# Altium footprint library CL21A226MAYNNNE.PcbLib: 3 footprints
Each footprint in its own frame and in the unit in brackets; x right, y up, seen from the top. Pads: shape width x height; smd on the part's side, far side on the other; paste and mask are expansions set on the pad; w line width, h text height; cw(c..) or ccw(c..) is an arc to the next point about the centre after c.
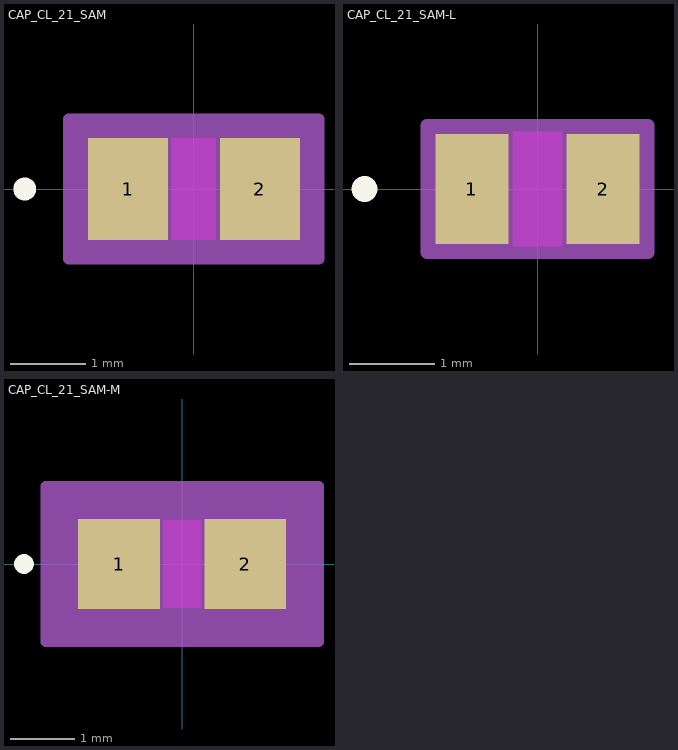
[diagram p0: the footprints below, top view; thin cyan lines are the x and y axes]

## CAP_CL_21_SAM [mil]
pads (2):
  rect 41.78x53 smd paste+0 mask+0: 1(-34.39,0) 2(34.39,0)
Top Layer keep-out:
  region: -11.5,-24.5 -11.5,24.5 11.5,24.5 11.5,-24.5
Top Overlay:
  circle w6: c-88.28,0 r3
  text ".Designator" at -137.5,-25 h50
Keep-Out Layer:
  region: -11.5,-26.5 -11.5,26.5 11.5,26.5 11.5,-26.5
Mechanical 13:
  circle w1: c-29.39,0 r3
  lines w1: -41.5,-26.5 -41.5,26.5 ; -41.5,-26.5 -13.5,-26.5 -13.5,26.5 -41.5,26.5 ; -41.5,-26.5 41.5,-26.5 ; -41.5,-26.5 -41.5,26.5 ; -41.5,26.5 41.5,26.5 ; 41.5,-26.5 13.5,-26.5 13.5,26.5 41.5,26.5 ; 41.5,-26.5 41.5,26.5 ; 41.5,-26.5 41.5,26.5
  text ".Designator" at -137.5,-25 h50
Mechanical 15:
  region: 65.28,-36.5 -65.28,-36.5 -65.28,36.5 65.28,36.5
  lines w6: -65.28,-36.5 -65.28,36.5 65.28,36.5 65.28,-36.5 -65.28,-36.5
3D body "CAP_CL_21_SAM.step": height 52.99, standoff 0, extent -41.5,-26.5 41.5,26.5

## CAP_CL_21_SAM-L [mil]
pads (2):
  rect 33.91x51.03 smd paste+0 mask+0: 1(-30.45,0) 2(30.45,0)
Top Layer keep-out:
  region: -11.5,-24.5 -11.5,24.5 11.5,24.5 11.5,-24.5
Top Overlay:
  circle w6: c-80.41,0 r3
  text ".Designator" at -137.5,-25 h50
Keep-Out Layer:
  region: -11.5,-26.5 -11.5,26.5 11.5,26.5 11.5,-26.5
Mechanical 13:
  circle w1: c-25.45,0 r3
  lines w1: -41.5,-26.5 -41.5,26.5 ; -41.5,-26.5 -13.5,-26.5 -13.5,26.5 -41.5,26.5 ; -41.5,-26.5 41.5,-26.5 ; -41.5,-26.5 -41.5,26.5 ; -41.5,26.5 41.5,26.5 ; 41.5,-26.5 13.5,-26.5 13.5,26.5 41.5,26.5 ; 41.5,-26.5 41.5,26.5 ; 41.5,-26.5 41.5,26.5
  text ".Designator" at -137.5,-25 h50
Mechanical 15:
  region: 51.41,-29.52 -51.41,-29.52 -51.41,29.52 51.41,29.52
  lines w6: -51.41,-29.52 -51.41,29.52 51.41,29.52 51.41,-29.52 -51.41,-29.52
3D body "CAP_CL_21_SAM.step": height 52.99, standoff 0, extent -41.5,-26.5 41.5,26.5

## CAP_CL_21_SAM-M [mil]
pads (2):
  rect 49.65x54.97 smd paste+0 mask+0: 1(-38.33,0) 2(38.33,0)
Top Layer keep-out:
  region: -11.5,-24.5 -11.5,24.5 11.5,24.5 11.5,-24.5
Top Overlay:
  circle w6: c-96.15,0 r3
  text ".Designator" at -137.5,-25 h50
Keep-Out Layer:
  region: -11.5,-26.5 -11.5,26.5 11.5,26.5 11.5,-26.5
Mechanical 13:
  circle w1: c-33.33,0 r3
  lines w1: -41.5,-26.5 -41.5,26.5 ; -41.5,-26.5 -13.5,-26.5 -13.5,26.5 -41.5,26.5 ; -41.5,-26.5 41.5,-26.5 ; -41.5,-26.5 -41.5,26.5 ; -41.5,26.5 41.5,26.5 ; 41.5,-26.5 13.5,-26.5 13.5,26.5 41.5,26.5 ; 41.5,-26.5 41.5,26.5 ; 41.5,-26.5 41.5,26.5
  text ".Designator" at -137.5,-25 h50
Mechanical 15:
  region: 83.15,-47.48 -83.15,-47.48 -83.15,47.48 83.15,47.48
  lines w6: -83.15,-47.48 -83.15,47.48 83.15,47.48 83.15,-47.48 -83.15,-47.48
3D body "CAP_CL_21_SAM.step": height 52.99, standoff 0, extent -41.5,-26.5 41.5,26.5